# Altium footprint library WR-PHD_Socket Header.PcbLib: 279 footprints (part 15 of 18)
Each footprint in its own frame and in the unit in brackets; x right, y up, seen from the top. Pads: shape width x height; smd on the part's side, far side on the other; paste and mask are expansions set on the pad; w line width, h text height; cw(c..) or ccw(c..) is an arc to the next point about the centre after c.
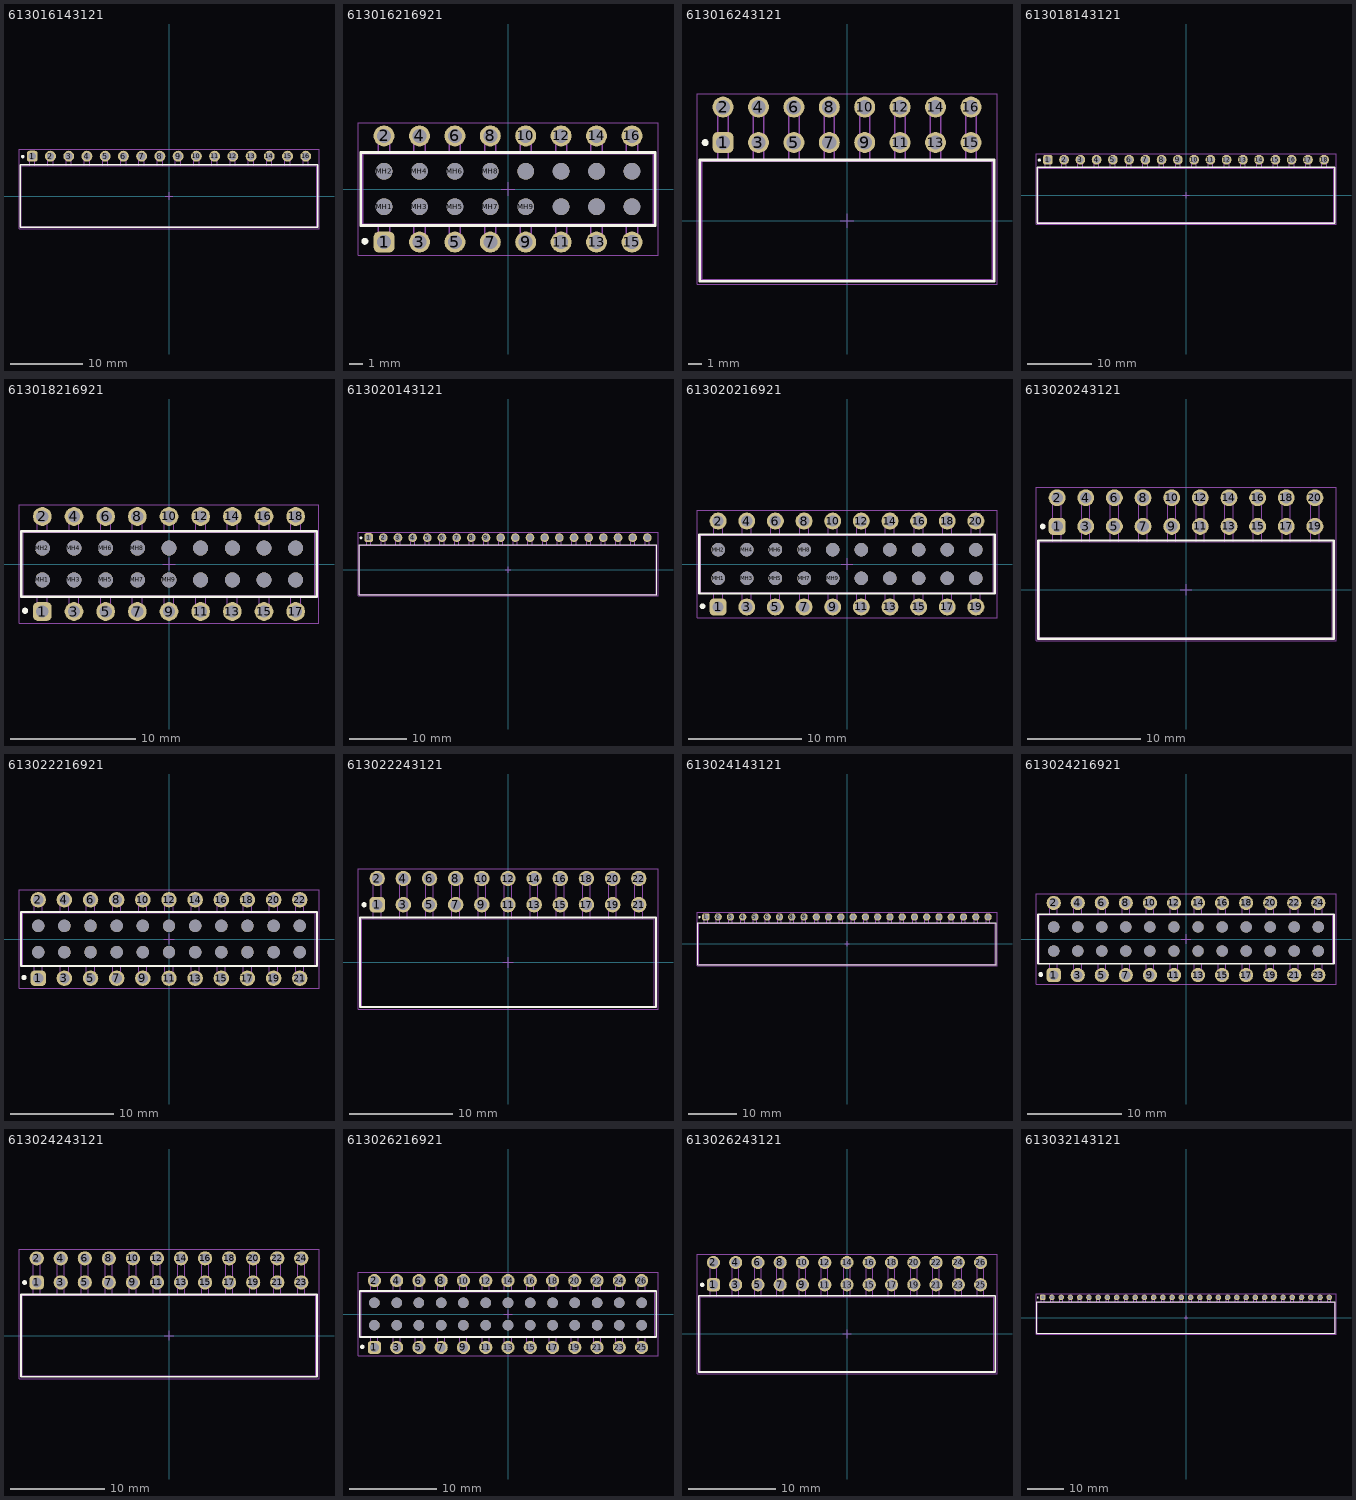
[diagram p14: the footprints below, top view; thin cyan lines are the x and y axes]

## 613016143121 [mm] "Socket Header, Pitch 2.54 mm, THT, Angled, single row, 16p"
height 2.5
pads (16):
  rrect50% 1.52x1.52 hole 1.02: 1(-19.05,5.55)
  round 1.52 hole 1.02: 2(-16.51,5.55) 3(-13.97,5.55) 4(-11.43,5.55) 5(-8.89,5.55) 6(-6.35,5.55) 7(-3.81,5.55) 8(-1.27,5.55) 9(1.27,5.55) 10(3.81,5.55) 11(6.35,5.55) 12(8.89,5.55) 13(11.43,5.55) 14(13.97,5.55) 15(16.51,5.55) 16(19.05,5.55)
Top Overlay:
  circle w0.25: c-20.38,5.5 r0.125
  lines w0.2: -20.695,-4.35 -20.695,4.35 20.695,4.35 20.695,-4.35 -20.695,-4.35
Top Designator:
  text ".Designator" at -7.498,-0.5 h1.5
Top Component Outline:
  lines w0.1: -19.42,4.25 -19.42,5.75 -18.68,5.75 -18.68,4.25 ; -16.88,4.25 -16.88,5.75 -16.14,5.75 -16.14,4.25 ; -14.34,4.25 -14.34,5.75 -13.6,5.75 -13.6,4.25 ; -11.8,4.25 -11.8,5.75 -11.06,5.75 -11.06,4.25 ; -9.26,4.25 -9.26,5.75 -8.52,5.75 -8.52,4.25 ; -6.72,4.25 -6.72,5.75 -5.98,5.75 -5.98,4.25 ; -4.18,4.25 -4.18,5.75 -3.44,5.75 -3.44,4.25 ; -1.64,4.25 -1.64,5.75 -0.9,5.75 -0.9,4.25 ; 0.9,4.25 0.9,5.75 1.64,5.75 1.64,4.25 ; 3.44,4.25 3.44,5.75 4.18,5.75 4.18,4.25 ; 5.98,4.25 5.98,5.75 6.72,5.75 6.72,4.25 ; 8.52,4.25 8.52,5.75 9.26,5.75 9.26,4.25 ; 11.06,4.25 11.06,5.75 11.8,5.75 11.8,4.25 ; 13.6,4.25 13.6,5.75 14.34,5.75 14.34,4.25 ; 16.14,4.25 16.14,5.75 16.88,5.75 16.88,4.25 ; 18.68,4.25 18.68,5.75 19.42,5.75 19.42,4.25 ; -20.57,-4.25 -20.57,4.25 20.57,4.25 20.57,-4.25 -20.57,-4.25
Top Courtyard:
  lines w0.05: -20.895,-4.55 20.895,-4.55 20.895,6.51 -20.895,6.51 -20.895,-4.55
Top Component Center:
  lines w0.05: -0.5,0 0.5,0 ; 0,-0.5 0,0.5
3D body "613016143121.stp": height 2.55, standoff -3.04, extent -20.57,-4.25 20.57,5.75

## 613016216921 [mm] "Socket Header, Pitch 2.54 mm, THT, Vertical, dual row, 16p"
height 5
pads (32):
  rrect50% 1.5x1.5 hole 1: 1(-8.89,-3.81)
  round 1.5 hole 1: 2(-8.89,3.81) 3(-6.35,-3.81) 4(-6.35,3.81) 5(-3.81,-3.81) 6(-3.81,3.81) 7(-1.27,-3.81) 8(-1.27,3.81) 9(1.27,-3.81) 10(1.27,3.81) 11(3.81,-3.81) 12(3.81,3.81) 13(6.35,-3.81) 14(6.35,3.81) 15(8.89,-3.81) 16(8.89,3.81)
  round 1.2 hole 1.2 unplated: MH1(-8.89,-1.27) MH2(-8.89,1.27) MH3(-6.35,-1.27) MH4(-6.35,1.27) MH5(-3.81,-1.27) MH6(-3.81,1.27) MH7(-1.27,-1.27) MH8(-1.27,1.27) MH9(1.27,-1.27) MH10(1.27,1.27) MH11(3.81,-1.27) MH12(3.81,1.27) MH13(6.35,-1.27) MH14(6.35,1.27) MH15(8.89,-1.27) MH16(8.89,1.27)
Top Overlay:
  circle w0.25: c-10.27,-3.75 r0.125
  lines w0.2: -10.56,-2.615 10.56,-2.615 10.56,2.615 -10.56,2.615 -10.56,-2.615
Top Designator:
  text ".Designator" at -7.498,-0.5 h1.5
Top Component Outline:
  lines w0.1: -9.29,-2.54 -9.29,-3.935 -8.49,-3.935 -8.49,-2.54 ; -9.29,2.54 -9.29,3.935 -8.49,3.935 -8.49,2.54 ; -6.75,-2.54 -6.75,-3.935 -5.95,-3.935 -5.95,-2.54 ; -6.75,2.54 -6.75,3.935 -5.95,3.935 -5.95,2.54 ; -4.21,-2.54 -4.21,-3.935 -3.41,-3.935 -3.41,-2.54 ; -4.21,2.54 -4.21,3.935 -3.41,3.935 -3.41,2.54 ; -1.67,-2.54 -1.67,-3.935 -0.87,-3.935 -0.87,-2.54 ; -1.67,2.54 -1.67,3.935 -0.87,3.935 -0.87,2.54 ; 0.87,-2.54 0.87,-3.935 1.67,-3.935 1.67,-2.54 ; 0.87,2.54 0.87,3.935 1.67,3.935 1.67,2.54 ; 3.41,-2.54 3.41,-3.935 4.21,-3.935 4.21,-2.54 ; 3.41,2.54 3.41,3.935 4.21,3.935 4.21,2.54 ; 5.95,-2.54 5.95,-3.935 6.75,-3.935 6.75,-2.54 ; 5.95,2.54 5.95,3.935 6.75,3.935 6.75,2.54 ; 8.49,-2.54 8.49,-3.935 9.29,-3.935 9.29,-2.54 ; 8.49,2.54 8.49,3.935 9.29,3.935 9.29,2.54 ; -10.41,-2.54 -10.41,2.54 10.41,2.54 10.41,-2.54 -10.41,-2.54
Top Courtyard:
  lines w0.05: -10.76,-4.76 10.76,-4.76 10.76,4.76 -10.76,4.76 -10.76,-4.76
Top Component Center:
  lines w0.05: -0.5,0 0.5,0 ; 0,-0.5 0,0.5
3D body "613016216921.stp": height 5.02, standoff -3.08, extent -10.41,-3.935 10.41,3.935

## 613016243121 [mm] "Socket Header, Pitch 2.54 mm, THT, Angled, dual row, 16p"
height 5.08
pads (16):
  rrect50% 1.5x1.5 hole 1.03: 1(-8.89,5.61)
  round 1.5 hole 1.03: 2(-8.89,8.15) 3(-6.35,5.61) 4(-6.35,8.15) 5(-3.81,5.61) 6(-3.81,8.15) 7(-1.27,5.61) 8(-1.27,8.15) 9(1.27,5.61) 10(1.27,8.15) 11(3.81,5.61) 12(3.81,8.15) 13(6.35,5.61) 14(6.35,8.15) 15(8.89,5.61) 16(8.89,8.15)
Top Overlay:
  circle w0.25: c-10.17,5.6 r0.125
  lines w0.2: -10.56,-4.35 10.56,-4.35 10.56,4.35 -10.56,4.35 -10.56,-4.35
Top Designator:
  text ".Designator" at -7.498,-0.5 h1.5
Top Component Outline:
  lines w0.1: -9.26,4.25 -9.26,8.35 -8.52,8.35 -8.52,4.25 ; -9.26,5.81 -8.52,5.81 ; -6.72,4.25 -6.72,8.35 -5.98,8.35 -5.98,4.25 ; -6.72,5.81 -5.98,5.81 ; -4.18,4.25 -4.18,8.35 -3.44,8.35 -3.44,4.25 ; -4.18,5.81 -3.44,5.81 ; -1.64,4.25 -1.64,8.35 -0.9,8.35 -0.9,4.25 ; -1.64,5.81 -0.9,5.81 ; 0.9,4.25 0.9,8.35 1.64,8.35 1.64,4.25 ; 0.9,5.81 1.64,5.81 ; 3.44,4.25 3.44,8.35 4.18,8.35 4.18,4.25 ; 3.44,5.81 4.18,5.81 ; 5.98,4.25 5.98,8.35 6.72,8.35 6.72,4.25 ; 5.98,5.81 6.72,5.81 ; 8.52,4.25 8.52,8.35 9.26,8.35 9.26,4.25 ; 8.52,5.81 9.26,5.81 ; -10.41,-4.25 -10.41,4.25 10.41,4.25 10.41,-4.25 -10.41,-4.25
Top Courtyard:
  lines w0.05: -10.76,-4.55 -10.76,9.1 10.76,9.1 10.76,-4.55 -10.76,-4.55
Top Component Center:
  lines w0.05: -0.5,0 0.5,0 ; 0,-0.5 0,0.5
3D body "613016243121.stp": height 5.05, standoff -3.25, extent -10.41,-4.25 10.41,8.35

## 613018143121 [mm] "Socket Header, Pitch 2.54 mm, THT, Angled, single row, 18p"
height 2.5
pads (18):
  rrect50% 1.52x1.52 hole 1.02: 1(-21.59,5.55)
  round 1.52 hole 1.02: 2(-19.05,5.55) 3(-16.51,5.55) 4(-13.97,5.55) 5(-11.43,5.55) 6(-8.89,5.55) 7(-6.35,5.55) 8(-3.81,5.55) 9(-1.27,5.55) 10(1.27,5.55) 11(3.81,5.55) 12(6.35,5.55) 13(8.89,5.55) 14(11.43,5.55) 15(13.97,5.55) 16(16.51,5.55) 17(19.05,5.55) 18(21.59,5.55)
Top Overlay:
  circle w0.25: c-22.92,5.5 r0.125
  lines w0.2: -23.235,-4.35 -23.235,4.35 23.235,4.35 23.235,-4.35 -23.235,-4.35
Top Designator:
  text ".Designator" at -7.498,-0.5 h1.5
Top Component Outline:
  lines w0.1: -21.96,4.25 -21.96,5.75 -21.22,5.75 -21.22,4.25 ; -19.42,4.25 -19.42,5.75 -18.68,5.75 -18.68,4.25 ; -16.88,4.25 -16.88,5.75 -16.14,5.75 -16.14,4.25 ; -14.34,4.25 -14.34,5.75 -13.6,5.75 -13.6,4.25 ; -11.8,4.25 -11.8,5.75 -11.06,5.75 -11.06,4.25 ; -9.26,4.25 -9.26,5.75 -8.52,5.75 -8.52,4.25 ; -6.72,4.25 -6.72,5.75 -5.98,5.75 -5.98,4.25 ; -4.18,4.25 -4.18,5.75 -3.44,5.75 -3.44,4.25 ; -1.64,4.25 -1.64,5.75 -0.9,5.75 -0.9,4.25 ; 0.9,4.25 0.9,5.75 1.64,5.75 1.64,4.25 ; 3.44,4.25 3.44,5.75 4.18,5.75 4.18,4.25 ; 5.98,4.25 5.98,5.75 6.72,5.75 6.72,4.25 ; 8.52,4.25 8.52,5.75 9.26,5.75 9.26,4.25 ; 11.06,4.25 11.06,5.75 11.8,5.75 11.8,4.25 ; 13.6,4.25 13.6,5.75 14.34,5.75 14.34,4.25 ; 16.14,4.25 16.14,5.75 16.88,5.75 16.88,4.25 ; 18.68,4.25 18.68,5.75 19.42,5.75 19.42,4.25 ; 21.22,4.25 21.22,5.75 21.96,5.75 21.96,4.25 ; -23.11,-4.25 23.11,-4.25 23.11,4.25 -23.11,4.25 -23.11,-4.25
Top Courtyard:
  lines w0.05: -23.435,-4.55 23.435,-4.55 23.435,6.51 -23.435,6.51 -23.435,-4.55
Top Component Center:
  lines w0.05: -0.5,0 0.5,0 ; 0,-0.5 0,0.5
3D body "613018143121.stp": height 2.55, standoff -3.04, extent -23.11,-4.25 23.11,5.75

## 613018216921 [mm] "Socket Header, Pitch 2.54 mm, THT, Vertical, dual row, 18p"
height 5
pads (36):
  rrect50% 1.5x1.5 hole 1: 1(-10.16,-3.81)
  round 1.5 hole 1: 2(-10.16,3.81) 3(-7.62,-3.81) 4(-7.62,3.81) 5(-5.08,-3.81) 6(-5.08,3.81) 7(-2.54,-3.81) 8(-2.54,3.81) 9(0,-3.81) 10(0,3.81) 11(2.54,-3.81) 12(2.54,3.81) 13(5.08,-3.81) 14(5.08,3.81) 15(7.62,-3.81) 16(7.62,3.81) 17(10.16,-3.81) 18(10.16,3.81)
  round 1.2 hole 1.2 unplated: MH1(-10.16,-1.27) MH2(-10.16,1.27) MH3(-7.62,-1.27) MH4(-7.62,1.27) MH5(-5.08,-1.27) MH6(-5.08,1.27) MH7(-2.54,-1.27) MH8(-2.54,1.27) MH9(0,-1.27) MH10(0,1.27) MH11(2.54,-1.27) MH12(2.54,1.27) MH13(5.08,-1.27) MH14(5.08,1.27) MH15(7.62,-1.27) MH16(7.62,1.27) MH17(10.16,-1.27) MH18(10.16,1.27)
Top Overlay:
  circle w0.25: c-11.54,-3.75 r0.125
  lines w0.2: -11.83,-2.615 -11.83,2.615 11.83,2.615 11.83,-2.615 -11.83,-2.615
Top Designator:
  text ".Designator" at -7.498,-0.5 h1.5
Top Component Outline:
  lines w0.1: -10.56,-2.54 -10.56,-3.935 -9.76,-3.935 -9.76,-2.54 ; -10.56,2.54 -10.56,3.935 -9.76,3.935 -9.76,2.54 ; -8.02,-2.54 -8.02,-3.935 -7.22,-3.935 -7.22,-2.54 ; -8.02,2.54 -8.02,3.935 -7.22,3.935 -7.22,2.54 ; -5.48,-2.54 -5.48,-3.935 -4.68,-3.935 -4.68,-2.54 ; -5.48,2.54 -5.48,3.935 -4.68,3.935 -4.68,2.54 ; -2.94,-2.54 -2.94,-3.935 -2.14,-3.935 -2.14,-2.54 ; -2.94,2.54 -2.94,3.935 -2.14,3.935 -2.14,2.54 ; -0.4,-2.54 -0.4,-3.935 0.4,-3.935 0.4,-2.54 ; -0.4,2.54 -0.4,3.935 0.4,3.935 0.4,2.54 ; 2.14,-2.54 2.14,-3.935 2.94,-3.935 2.94,-2.54 ; 2.14,2.54 2.14,3.935 2.94,3.935 2.94,2.54 ; 4.68,-2.54 4.68,-3.935 5.48,-3.935 5.48,-2.54 ; 4.68,2.54 4.68,3.935 5.48,3.935 5.48,2.54 ; 7.22,-2.54 7.22,-3.935 8.02,-3.935 8.02,-2.54 ; 7.22,2.54 7.22,3.935 8.02,3.935 8.02,2.54 ; 9.76,-2.54 9.76,-3.935 10.56,-3.935 10.56,-2.54 ; 9.76,2.54 9.76,3.935 10.56,3.935 10.56,2.54 ; -11.68,-2.54 -11.68,2.54 11.68,2.54 11.68,-2.54 -11.68,-2.54
Top Courtyard:
  lines w0.05: -12.03,-4.76 -12.03,4.76 12.03,4.76 12.03,-4.76 -12.03,-4.76
Top Component Center:
  lines w0.05: -0.5,0 0.5,0 ; 0,-0.5 0,0.5
3D body "613018216921.stp": height 5.02, standoff -3.08, extent -11.68,-3.935 11.68,3.935

## 613020143121 [mm] "Socket Header, Pitch 2.54 mm, THT, Angled, single row, 20p"
height 2.5
pads (20):
  rrect50% 1.52x1.52 hole 1.02: 1(-24.13,5.55)
  round 1.52 hole 1.02: 2(-21.59,5.55) 3(-19.05,5.55) 4(-16.51,5.55) 5(-13.97,5.55) 6(-11.43,5.55) 7(-8.89,5.55) 8(-6.35,5.55) 9(-3.81,5.55) 10(-1.27,5.55) 11(1.27,5.55) 12(3.81,5.55) 13(6.35,5.55) 14(8.89,5.55) 15(11.43,5.55) 16(13.97,5.55) 17(16.51,5.55) 18(19.05,5.55) 19(21.59,5.55) 20(24.13,5.55)
Top Overlay:
  circle w0.25: c-25.46,5.5 r0.125
  lines w0.2: -25.775,-4.35 25.775,-4.35 25.775,4.35 -25.775,4.35 -25.775,-4.35
Top Designator:
  text ".Designator" at -7.498,-0.5 h1.5
Top Component Outline:
  lines w0.1: -24.5,4.25 -24.5,5.75 -23.76,5.75 -23.76,4.25 ; -21.96,4.25 -21.96,5.75 -21.22,5.75 -21.22,4.25 ; -19.42,4.25 -19.42,5.75 -18.68,5.75 -18.68,4.25 ; -16.88,4.25 -16.88,5.75 -16.14,5.75 -16.14,4.25 ; -14.34,4.25 -14.34,5.75 -13.6,5.75 -13.6,4.25 ; -11.8,4.25 -11.8,5.75 -11.06,5.75 -11.06,4.25 ; -9.26,4.25 -9.26,5.75 -8.52,5.75 -8.52,4.25 ; -6.72,4.25 -6.72,5.75 -5.98,5.75 -5.98,4.25 ; -4.18,4.25 -4.18,5.75 -3.44,5.75 -3.44,4.25 ; -1.64,4.25 -1.64,5.75 -0.9,5.75 -0.9,4.25 ; 0.9,4.25 0.9,5.75 1.64,5.75 1.64,4.25 ; 3.44,4.25 3.44,5.75 4.18,5.75 4.18,4.25 ; 5.98,4.25 5.98,5.75 6.72,5.75 6.72,4.25 ; 8.52,4.25 8.52,5.75 9.26,5.75 9.26,4.25 ; 11.06,4.25 11.06,5.75 11.8,5.75 11.8,4.25 ; 13.6,4.25 13.6,5.75 14.34,5.75 14.34,4.25 ; 16.14,4.25 16.14,5.75 16.88,5.75 16.88,4.25 ; 18.68,4.25 18.68,5.75 19.42,5.75 19.42,4.25 ; 21.22,4.25 21.22,5.75 21.96,5.75 21.96,4.25 ; 23.76,4.25 23.76,5.75 24.5,5.75 24.5,4.25 ; -25.65,-4.25 -25.65,4.25 25.65,4.25 25.65,-4.25 -25.65,-4.25
Top Courtyard:
  lines w0.05: -25.975,-4.55 -25.975,6.51 25.975,6.51 25.975,-4.55 -25.975,-4.55
Top Component Center:
  lines w0.05: -0.5,0 0.5,0 ; 0,-0.5 0,0.5
3D body "613020143121.stp": height 2.55, standoff -3.04, extent -25.65,-4.25 25.65,5.75

## 613020216921 [mm] "Socket Header, Pitch 2.54 mm, THT, Vertical, dual row, 20p"
height 5
pads (40):
  rrect50% 1.5x1.5 hole 1: 1(-11.43,-3.81)
  round 1.5 hole 1: 2(-11.43,3.81) 3(-8.89,-3.81) 4(-8.89,3.81) 5(-6.35,-3.81) 6(-6.35,3.81) 7(-3.81,-3.81) 8(-3.81,3.81) 9(-1.27,-3.81) 10(-1.27,3.81) 11(1.27,-3.81) 12(1.27,3.81) 13(3.81,-3.81) 14(3.81,3.81) 15(6.35,-3.81) 16(6.35,3.81) 17(8.89,-3.81) 18(8.89,3.81) 19(11.43,-3.81) 20(11.43,3.81)
  round 1.2 hole 1.2 unplated: MH1(-11.43,-1.27) MH2(-11.43,1.27) MH3(-8.89,-1.27) MH4(-8.89,1.27) MH5(-6.35,-1.27) MH6(-6.35,1.27) MH7(-3.81,-1.27) MH8(-3.81,1.27) MH9(-1.27,-1.27) MH10(-1.27,1.27) MH11(1.27,-1.27) MH12(1.27,1.27) MH13(3.81,-1.27) MH14(3.81,1.27) MH15(6.35,-1.27) MH16(6.35,1.27) MH17(8.89,-1.27) MH18(8.89,1.27) MH19(11.43,-1.27) MH20(11.43,1.27)
Top Overlay:
  circle w0.25: c-12.81,-3.75 r0.125
  lines w0.2: -13.1,-2.615 -13.1,2.615 13.1,2.615 13.1,-2.615 -13.1,-2.615
Top Designator:
  text ".Designator" at -7.498,-0.5 h1.5
Top Component Outline:
  lines w0.1: -11.83,-2.54 -11.83,-3.935 -11.03,-3.935 -11.03,-2.54 ; -11.83,2.54 -11.83,3.935 -11.03,3.935 -11.03,2.54 ; -9.29,-2.54 -9.29,-3.935 -8.49,-3.935 -8.49,-2.54 ; -9.29,2.54 -9.29,3.935 -8.49,3.935 -8.49,2.54 ; -6.75,-2.54 -6.75,-3.935 -5.95,-3.935 -5.95,-2.54 ; -6.75,2.54 -6.75,3.935 -5.95,3.935 -5.95,2.54 ; -4.21,-2.54 -4.21,-3.935 -3.41,-3.935 -3.41,-2.54 ; -4.21,2.54 -4.21,3.935 -3.41,3.935 -3.41,2.54 ; -1.67,-2.54 -1.67,-3.935 -0.87,-3.935 -0.87,-2.54 ; -1.67,2.54 -1.67,3.935 -0.87,3.935 -0.87,2.54 ; 0.87,-2.54 0.87,-3.935 1.67,-3.935 1.67,-2.54 ; 0.87,2.54 0.87,3.935 1.67,3.935 1.67,2.54 ; 3.41,-2.54 3.41,-3.935 4.21,-3.935 4.21,-2.54 ; 3.41,2.54 3.41,3.935 4.21,3.935 4.21,2.54 ; 5.95,-2.54 5.95,-3.935 6.75,-3.935 6.75,-2.54 ; 5.95,2.54 5.95,3.935 6.75,3.935 6.75,2.54 ; 8.49,-2.54 8.49,-3.935 9.29,-3.935 9.29,-2.54 ; 8.49,2.54 8.49,3.935 9.29,3.935 9.29,2.54 ; 11.03,-2.54 11.03,-3.935 11.83,-3.935 11.83,-2.54 ; 11.03,2.54 11.03,3.935 11.83,3.935 11.83,2.54 ; -12.95,-2.54 12.95,-2.54 12.95,2.54 -12.95,2.54 -12.95,-2.54
Top Courtyard:
  lines w0.05: -13.3,-4.76 -13.3,4.76 13.3,4.76 13.3,-4.76 -13.3,-4.76
Top Component Center:
  lines w0.05: -0.5,0 0.5,0 ; 0,-0.5 0,0.5
3D body "613020216921.stp": height 5.02, standoff -3.08, extent -12.95,-3.935 12.95,3.935

## 613020243121 [mm] "Socket Header, Pitch 2.54 mm, THT, Angled, dual row, 20p"
height 5.08
pads (20):
  rrect50% 1.5x1.5 hole 1.03: 1(-11.43,5.61)
  round 1.5 hole 1.03: 2(-11.43,8.15) 3(-8.89,5.61) 4(-8.89,8.15) 5(-6.35,5.61) 6(-6.35,8.15) 7(-3.81,5.61) 8(-3.81,8.15) 9(-1.27,5.61) 10(-1.27,8.15) 11(1.27,5.61) 12(1.27,8.15) 13(3.81,5.61) 14(3.81,8.15) 15(6.35,5.61) 16(6.35,8.15) 17(8.89,5.61) 18(8.89,8.15) 19(11.43,5.61) 20(11.43,8.15)
Top Overlay:
  circle w0.25: c-12.71,5.6 r0.125
  lines w0.2: -13.1,-4.35 -13.1,4.35 13.1,4.35 13.1,-4.35 -13.1,-4.35
Top Designator:
  text ".Designator" at -7.498,-0.5 h1.5
Top Component Outline:
  lines w0.1: -11.8,4.25 -11.8,8.35 -11.06,8.35 -11.06,4.25 ; -11.8,5.81 -11.06,5.81 ; -9.26,4.25 -9.26,8.35 -8.52,8.35 -8.52,4.25 ; -9.26,5.81 -8.52,5.81 ; -6.72,4.25 -6.72,8.35 -5.98,8.35 -5.98,4.25 ; -6.72,5.81 -5.98,5.81 ; -4.18,4.25 -4.18,8.35 -3.44,8.35 -3.44,4.25 ; -4.18,5.81 -3.44,5.81 ; -1.64,4.25 -1.64,8.35 -0.9,8.35 -0.9,4.25 ; -1.64,5.81 -0.9,5.81 ; 0.9,4.25 0.9,8.35 1.64,8.35 1.64,4.25 ; 0.9,5.81 1.64,5.81 ; 3.44,4.25 3.44,8.35 4.18,8.35 4.18,4.25 ; 3.44,5.81 4.18,5.81 ; 5.98,4.25 5.98,8.35 6.72,8.35 6.72,4.25 ; 5.98,5.81 6.72,5.81 ; 8.52,4.25 8.52,8.35 9.26,8.35 9.26,4.25 ; 8.52,5.81 9.26,5.81 ; 11.06,4.25 11.06,8.35 11.8,8.35 11.8,4.25 ; 11.06,5.81 11.8,5.81 ; -12.95,-4.25 -12.95,4.25 12.95,4.25 12.95,-4.25 -12.95,-4.25
Top Courtyard:
  lines w0.05: -13.3,-4.55 13.3,-4.55 13.3,9.1 -13.3,9.1 -13.3,-4.55
Top Component Center:
  lines w0.05: -0.5,0 0.5,0 ; 0,-0.5 0,0.5
3D body "613020243121.stp": height 5.05, standoff -3.25, extent -12.95,-4.25 12.95,8.35

## 613022216921 [mm] "Socket Header, Pitch 2.54 mm, THT, Vertical, dual row, 22p"
height 5
pads (44):
  rrect50% 1.5x1.5 hole 1: 1(-12.7,-3.81)
  round 1.5 hole 1: 2(-12.7,3.81) 3(-10.16,-3.81) 4(-10.16,3.81) 5(-7.62,-3.81) 6(-7.62,3.81) 7(-5.08,-3.81) 8(-5.08,3.81) 9(-2.54,-3.81) 10(-2.54,3.81) 11(0,-3.81) 12(0,3.81) 13(2.54,-3.81) 14(2.54,3.81) 15(5.08,-3.81) 16(5.08,3.81) 17(7.62,-3.81) 18(7.62,3.81) 19(10.16,-3.81) 20(10.16,3.81) 21(12.7,-3.81) 22(12.7,3.81)
  round 1.2 hole 1.2 unplated: MH1(-12.7,-1.27) MH2(-12.7,1.27) MH3(-10.16,-1.27) MH4(-10.16,1.27) MH5(-7.62,-1.27) MH6(-7.62,1.27) MH7(-5.08,-1.27) MH8(-5.08,1.27) MH9(-2.54,-1.27) MH10(-2.54,1.27) MH11(0,-1.27) MH12(0,1.27) MH13(2.54,-1.27) MH14(2.54,1.27) MH15(5.08,-1.27) MH16(5.08,1.27) MH17(7.62,-1.27) MH18(7.62,1.27) MH19(10.16,-1.27) MH20(10.16,1.27) MH21(12.7,-1.27) MH22(12.7,1.27)
Top Overlay:
  circle w0.25: c-14.08,-3.75 r0.125
  lines w0.2: -14.37,-2.615 14.37,-2.615 14.37,2.615 -14.37,2.615 -14.37,-2.615
Top Designator:
  text ".Designator" at -7.498,-0.5 h1.5
Top Component Outline:
  lines w0.1: -13.1,-2.54 -13.1,-3.935 -12.3,-3.935 -12.3,-2.54 ; -13.1,2.54 -13.1,3.935 -12.3,3.935 -12.3,2.54 ; -10.56,-2.54 -10.56,-3.935 -9.76,-3.935 -9.76,-2.54 ; -10.56,2.54 -10.56,3.935 -9.76,3.935 -9.76,2.54 ; -8.02,-2.54 -8.02,-3.935 -7.22,-3.935 -7.22,-2.54 ; -8.02,2.54 -8.02,3.935 -7.22,3.935 -7.22,2.54 ; -5.48,-2.54 -5.48,-3.935 -4.68,-3.935 -4.68,-2.54 ; -5.48,2.54 -5.48,3.935 -4.68,3.935 -4.68,2.54 ; -2.94,-2.54 -2.94,-3.935 -2.14,-3.935 -2.14,-2.54 ; -2.94,2.54 -2.94,3.935 -2.14,3.935 -2.14,2.54 ; -0.4,-2.54 -0.4,-3.935 0.4,-3.935 0.4,-2.54 ; -0.4,2.54 -0.4,3.935 0.4,3.935 0.4,2.54 ; 2.14,-2.54 2.14,-3.935 2.94,-3.935 2.94,-2.54 ; 2.14,2.54 2.14,3.935 2.94,3.935 2.94,2.54 ; 4.68,-2.54 4.68,-3.935 5.48,-3.935 5.48,-2.54 ; 4.68,2.54 4.68,3.935 5.48,3.935 5.48,2.54 ; 7.22,-2.54 7.22,-3.935 8.02,-3.935 8.02,-2.54 ; 7.22,2.54 7.22,3.935 8.02,3.935 8.02,2.54 ; 9.76,-2.54 9.76,-3.935 10.56,-3.935 10.56,-2.54 ; 9.76,2.54 9.76,3.935 10.56,3.935 10.56,2.54 ; 12.3,-2.54 12.3,-3.935 13.1,-3.935 13.1,-2.54 ; 12.3,2.54 12.3,3.935 13.1,3.935 13.1,2.54 ; -14.22,-2.54 14.22,-2.54 14.22,2.54 -14.22,2.54 -14.22,-2.54
Top Courtyard:
  lines w0.05: -14.57,-4.76 14.57,-4.76 14.57,4.76 -14.57,4.76 -14.57,-4.76
Top Component Center:
  lines w0.05: -0.5,0 0.5,0 ; 0,-0.5 0,0.5
3D body "613022216921.stp": height 5.02, standoff -3.08, extent -14.22,-3.935 14.22,3.935

## 613022243121 [mm] "Socket Header, Pitch 2.54 mm, THT, Angled, dual row, 22p"
height 5.08
pads (22):
  rrect50% 1.5x1.5 hole 1.03: 1(-12.7,5.61)
  round 1.5 hole 1.03: 2(-12.7,8.15) 3(-10.16,5.61) 4(-10.16,8.15) 5(-7.62,5.61) 6(-7.62,8.15) 7(-5.08,5.61) 8(-5.08,8.15) 9(-2.54,5.61) 10(-2.54,8.15) 11(0,5.61) 12(0,8.15) 13(2.54,5.61) 14(2.54,8.15) 15(5.08,5.61) 16(5.08,8.15) 17(7.62,5.61) 18(7.62,8.15) 19(10.16,5.61) 20(10.16,8.15) 21(12.7,5.61) 22(12.7,8.15)
Top Overlay:
  circle w0.25: c-13.98,5.6 r0.125
  lines w0.2: -14.37,-4.35 -14.37,4.35 14.37,4.35 14.37,-4.35 -14.37,-4.35
Top Designator:
  text ".Designator" at -7.498,-0.5 h1.5
Top Component Outline:
  lines w0.1: -13.07,4.25 -13.07,8.35 -12.33,8.35 -12.33,4.25 ; -13.07,5.81 -12.33,5.81 ; -10.53,4.25 -10.53,8.35 -9.79,8.35 -9.79,4.25 ; -10.53,5.81 -9.79,5.81 ; -7.99,4.25 -7.99,8.35 -7.25,8.35 -7.25,4.25 ; -7.99,5.81 -7.25,5.81 ; -5.45,4.25 -5.45,8.35 -4.71,8.35 -4.71,4.25 ; -5.45,5.81 -4.71,5.81 ; -2.91,4.25 -2.91,8.35 -2.17,8.35 -2.17,4.25 ; -2.91,5.81 -2.17,5.81 ; -0.37,4.25 -0.37,8.35 0.37,8.35 0.37,4.25 ; -0.37,5.81 0.37,5.81 ; 2.17,4.25 2.17,8.35 2.91,8.35 2.91,4.25 ; 2.17,5.81 2.91,5.81 ; 4.71,4.25 4.71,8.35 5.45,8.35 5.45,4.25 ; 4.71,5.81 5.45,5.81 ; 7.25,4.25 7.25,8.35 7.99,8.35 7.99,4.25 ; 7.25,5.81 7.99,5.81 ; 9.79,4.25 9.79,8.35 10.53,8.35 10.53,4.25 ; 9.79,5.81 10.53,5.81 ; 12.33,4.25 12.33,8.35 13.07,8.35 13.07,4.25 ; 12.33,5.81 13.07,5.81 ; -14.22,-4.25 -14.22,4.25 14.22,4.25 14.22,-4.25 -14.22,-4.25
Top Courtyard:
  lines w0.05: -14.57,-4.55 14.57,-4.55 14.57,9.1 -14.57,9.1 -14.57,-4.55
Top Component Center:
  lines w0.05: -0.5,0 0.5,0 ; 0,-0.5 0,0.5
3D body "613022243121.stp": height 5.05, standoff -3.25, extent -14.22,-4.25 14.22,8.35

## 613024143121 [mm] "Socket Header, Pitch 2.54 mm, THT, Angled, single row, 24p"
height 2.5
pads (24):
  rrect50% 1.52x1.52 hole 1.02: 1(-29.21,5.55)
  round 1.52 hole 1.02: 2(-26.67,5.55) 3(-24.13,5.55) 4(-21.59,5.55) 5(-19.05,5.55) 6(-16.51,5.55) 7(-13.97,5.55) 8(-11.43,5.55) 9(-8.89,5.55) 10(-6.35,5.55) 11(-3.81,5.55) 12(-1.27,5.55) 13(1.27,5.55) 14(3.81,5.55) 15(6.35,5.55) 16(8.89,5.55) 17(11.43,5.55) 18(13.97,5.55) 19(16.51,5.55) 20(19.05,5.55) 21(21.59,5.55) 22(24.13,5.55) 23(26.67,5.55) 24(29.21,5.55)
Top Overlay:
  circle w0.25: c-30.54,5.5 r0.125
  lines w0.2: -30.855,-4.35 -30.855,4.35 30.855,4.35 30.855,-4.35 -30.855,-4.35
Top Designator:
  text ".Designator" at -7.498,-0.5 h1.5
Top Component Outline:
  lines w0.1: -29.58,4.25 -29.58,5.75 -28.84,5.75 -28.84,4.25 ; -27.04,4.25 -27.04,5.75 -26.3,5.75 -26.3,4.25 ; -24.5,4.25 -24.5,5.75 -23.76,5.75 -23.76,4.25 ; -21.96,4.25 -21.96,5.75 -21.22,5.75 -21.22,4.25 ; -19.42,4.25 -19.42,5.75 -18.68,5.75 -18.68,4.25 ; -16.88,4.25 -16.88,5.75 -16.14,5.75 -16.14,4.25 ; -14.34,4.25 -14.34,5.75 -13.6,5.75 -13.6,4.25 ; -11.8,4.25 -11.8,5.75 -11.06,5.75 -11.06,4.25 ; -9.26,4.25 -9.26,5.75 -8.52,5.75 -8.52,4.25 ; -6.72,4.25 -6.72,5.75 -5.98,5.75 -5.98,4.25 ; -4.18,4.25 -4.18,5.75 -3.44,5.75 -3.44,4.25 ; -1.64,4.25 -1.64,5.75 -0.9,5.75 -0.9,4.25 ; 0.9,4.25 0.9,5.75 1.64,5.75 1.64,4.25 ; 3.44,4.25 3.44,5.75 4.18,5.75 4.18,4.25 ; 5.98,4.25 5.98,5.75 6.72,5.75 6.72,4.25 ; 8.52,4.25 8.52,5.75 9.26,5.75 9.26,4.25 ; 11.06,4.25 11.06,5.75 11.8,5.75 11.8,4.25 ; 13.6,4.25 13.6,5.75 14.34,5.75 14.34,4.25 ; 16.14,4.25 16.14,5.75 16.88,5.75 16.88,4.25 ; 18.68,4.25 18.68,5.75 19.42,5.75 19.42,4.25 ; 21.22,4.25 21.22,5.75 21.96,5.75 21.96,4.25 ; 23.76,4.25 23.76,5.75 24.5,5.75 24.5,4.25 ; 26.3,4.25 26.3,5.75 27.04,5.75 27.04,4.25 ; 28.84,4.25 28.84,5.75 29.58,5.75 29.58,4.25 ; -30.73,-4.25 30.73,-4.25 30.73,4.25 -30.73,4.25 -30.73,-4.25
Top Courtyard:
  lines w0.05: -31.055,-4.55 31.055,-4.55 31.055,6.51 -31.055,6.51 -31.055,-4.55
Top Component Center:
  lines w0.05: -0.5,0 0.5,0 ; 0,-0.5 0,0.5
3D body "613024143121.stp": height 2.55, standoff -3.04, extent -30.73,-4.25 30.73,5.75

## 613024216921 [mm] "Socket Header, Pitch 2.54 mm, THT, Vertical, dual row, 24p"
height 5
pads (48):
  rrect50% 1.5x1.5 hole 1: 1(-13.97,-3.81)
  round 1.5 hole 1: 2(-13.97,3.81) 3(-11.43,-3.81) 4(-11.43,3.81) 5(-8.89,-3.81) 6(-8.89,3.81) 7(-6.35,-3.81) 8(-6.35,3.81) 9(-3.81,-3.81) 10(-3.81,3.81) 11(-1.27,-3.81) 12(-1.27,3.81) 13(1.27,-3.81) 14(1.27,3.81) 15(3.81,-3.81) 16(3.81,3.81) 17(6.35,-3.81) 18(6.35,3.81) 19(8.89,-3.81) 20(8.89,3.81) 21(11.43,-3.81) 22(11.43,3.81) 23(13.97,-3.81) 24(13.97,3.81)
  round 1.2 hole 1.2 unplated: MH1(-13.97,-1.27) MH2(-13.97,1.27) MH3(-11.43,-1.27) MH4(-11.43,1.27) MH5(-8.89,-1.27) MH6(-8.89,1.27) MH7(-6.35,-1.27) MH8(-6.35,1.27) MH9(-3.81,-1.27) MH10(-3.81,1.27) MH11(-1.27,-1.27) MH12(-1.27,1.27) MH13(1.27,-1.27) MH14(1.27,1.27) MH15(3.81,-1.27) MH16(3.81,1.27) MH17(6.35,-1.27) MH18(6.35,1.27) MH19(8.89,-1.27) MH20(8.89,1.27) MH21(11.43,-1.27) MH22(11.43,1.27) MH23(13.97,-1.27) MH24(13.97,1.27)
Top Overlay:
  circle w0.25: c-15.35,-3.75 r0.125
  lines w0.2: -15.64,-2.615 15.64,-2.615 15.64,2.615 -15.64,2.615 -15.64,-2.615
Top Designator:
  text ".Designator" at -7.498,-0.5 h1.5
Top Component Outline:
  lines w0.1: -14.37,-2.54 -14.37,-3.935 -13.57,-3.935 -13.57,-2.54 ; -14.37,2.54 -14.37,3.935 -13.57,3.935 -13.57,2.54 ; -11.83,-2.54 -11.83,-3.935 -11.03,-3.935 -11.03,-2.54 ; -11.83,2.54 -11.83,3.935 -11.03,3.935 -11.03,2.54 ; -9.29,-2.54 -9.29,-3.935 -8.49,-3.935 -8.49,-2.54 ; -9.29,2.54 -9.29,3.935 -8.49,3.935 -8.49,2.54 ; -6.75,-2.54 -6.75,-3.935 -5.95,-3.935 -5.95,-2.54 ; -6.75,2.54 -6.75,3.935 -5.95,3.935 -5.95,2.54 ; -4.21,-2.54 -4.21,-3.935 -3.41,-3.935 -3.41,-2.54 ; -4.21,2.54 -4.21,3.935 -3.41,3.935 -3.41,2.54 ; -1.67,-2.54 -1.67,-3.935 -0.87,-3.935 -0.87,-2.54 ; -1.67,2.54 -1.67,3.935 -0.87,3.935 -0.87,2.54 ; 0.87,-2.54 0.87,-3.935 1.67,-3.935 1.67,-2.54 ; 0.87,2.54 0.87,3.935 1.67,3.935 1.67,2.54 ; 3.41,-2.54 3.41,-3.935 4.21,-3.935 4.21,-2.54 ; 3.41,2.54 3.41,3.935 4.21,3.935 4.21,2.54 ; 5.95,-2.54 5.95,-3.935 6.75,-3.935 6.75,-2.54 ; 5.95,2.54 5.95,3.935 6.75,3.935 6.75,2.54 ; 8.49,-2.54 8.49,-3.935 9.29,-3.935 9.29,-2.54 ; 8.49,2.54 8.49,3.935 9.29,3.935 9.29,2.54 ; 11.03,-2.54 11.03,-3.935 11.83,-3.935 11.83,-2.54 ; 11.03,2.54 11.03,3.935 11.83,3.935 11.83,2.54 ; 13.57,-2.54 13.57,-3.935 14.37,-3.935 14.37,-2.54 ; 13.57,2.54 13.57,3.935 14.37,3.935 14.37,2.54 ; -15.49,-2.54 -15.49,2.54 15.49,2.54 15.49,-2.54 -15.49,-2.54
Top Courtyard:
  lines w0.05: -15.84,-4.76 15.84,-4.76 15.84,4.76 -15.84,4.76 -15.84,-4.76
Top Component Center:
  lines w0.05: -0.5,0 0.5,0 ; 0,-0.5 0,0.5
3D body "613024216921.stp": height 5.02, standoff -3.08, extent -15.49,-3.935 15.49,3.935

## 613024243121 [mm] "Socket Header, Pitch 2.54 mm, THT, Angled, dual row, 24p"
height 5.08
pads (24):
  rrect50% 1.5x1.5 hole 1.03: 1(-13.97,5.61)
  round 1.5 hole 1.03: 2(-13.97,8.15) 3(-11.43,5.61) 4(-11.43,8.15) 5(-8.89,5.61) 6(-8.89,8.15) 7(-6.35,5.61) 8(-6.35,8.15) 9(-3.81,5.61) 10(-3.81,8.15) 11(-1.27,5.61) 12(-1.27,8.15) 13(1.27,5.61) 14(1.27,8.15) 15(3.81,5.61) 16(3.81,8.15) 17(6.35,5.61) 18(6.35,8.15) 19(8.89,5.61) 20(8.89,8.15) 21(11.43,5.61) 22(11.43,8.15) 23(13.97,5.61) 24(13.97,8.15)
Top Overlay:
  circle w0.25: c-15.25,5.6 r0.125
  lines w0.2: -15.64,-4.35 15.64,-4.35 15.64,4.35 -15.64,4.35 -15.64,-4.35
Top Designator:
  text ".Designator" at -7.498,-0.5 h1.5
Top Component Outline:
  lines w0.1: -14.34,4.25 -14.34,8.35 -13.6,8.35 -13.6,4.25 ; -14.34,5.81 -13.6,5.81 ; -11.8,4.25 -11.8,8.35 -11.06,8.35 -11.06,4.25 ; -11.8,5.81 -11.06,5.81 ; -9.26,4.25 -9.26,8.35 -8.52,8.35 -8.52,4.25 ; -9.26,5.81 -8.52,5.81 ; -6.72,4.25 -6.72,8.35 -5.98,8.35 -5.98,4.25 ; -6.72,5.81 -5.98,5.81 ; -4.18,4.25 -4.18,8.35 -3.44,8.35 -3.44,4.25 ; -4.18,5.81 -3.44,5.81 ; -1.64,4.25 -1.64,8.35 -0.9,8.35 -0.9,4.25 ; -1.64,5.81 -0.9,5.81 ; 0.9,4.25 0.9,8.35 1.64,8.35 1.64,4.25 ; 0.9,5.81 1.64,5.81 ; 3.44,4.25 3.44,8.35 4.18,8.35 4.18,4.25 ; 3.44,5.81 4.18,5.81 ; 5.98,4.25 5.98,8.35 6.72,8.35 6.72,4.25 ; 5.98,5.81 6.72,5.81 ; 8.52,4.25 8.52,8.35 9.26,8.35 9.26,4.25 ; 8.52,5.81 9.26,5.81 ; 11.06,4.25 11.06,8.35 11.8,8.35 11.8,4.25 ; 11.06,5.81 11.8,5.81 ; 13.6,4.25 13.6,8.35 14.34,8.35 14.34,4.25 ; 13.6,5.81 14.34,5.81 ; -15.49,-4.25 15.49,-4.25 15.49,4.25 -15.49,4.25 -15.49,-4.25
Top Courtyard:
  lines w0.05: -15.84,-4.55 -15.84,9.1 15.84,9.1 15.84,-4.55 -15.84,-4.55
Top Component Center:
  lines w0.05: -0.5,0 0.5,0 ; 0,-0.5 0,0.5
3D body "613024243121.stp": height 5.05, standoff -3.25, extent -15.49,-4.25 15.49,8.35

## 613026216921 [mm] "Socket Header, Pitch 2.54 mm, THT, Vertical, dual row, 26p"
height 5
pads (52):
  rrect50% 1.5x1.5 hole 1: 1(-15.24,-3.81)
  round 1.5 hole 1: 2(-15.24,3.81) 3(-12.7,-3.81) 4(-12.7,3.81) 5(-10.16,-3.81) 6(-10.16,3.81) 7(-7.62,-3.81) 8(-7.62,3.81) 9(-5.08,-3.81) 10(-5.08,3.81) 11(-2.54,-3.81) 12(-2.54,3.81) 13(0,-3.81) 14(0,3.81) 15(2.54,-3.81) 16(2.54,3.81) 17(5.08,-3.81) 18(5.08,3.81) 19(7.62,-3.81) 20(7.62,3.81) 21(10.16,-3.81) 22(10.16,3.81) 23(12.7,-3.81) 24(12.7,3.81) 25(15.24,-3.81) 26(15.24,3.81)
  round 1.2 hole 1.2 unplated: MH1(-15.24,-1.27) MH2(-15.24,1.27) MH3(-12.7,-1.27) MH4(-12.7,1.27) MH5(-10.16,-1.27) MH6(-10.16,1.27) MH7(-7.62,-1.27) MH8(-7.62,1.27) MH9(-5.08,-1.27) MH10(-5.08,1.27) MH11(-2.54,-1.27) MH12(-2.54,1.27) MH13(0,-1.27) MH14(0,1.27) MH15(2.54,-1.27) MH16(2.54,1.27) MH17(5.08,-1.27) MH18(5.08,1.27) MH19(7.62,-1.27) MH20(7.62,1.27) MH21(10.16,-1.27) MH22(10.16,1.27) MH23(12.7,-1.27) MH24(12.7,1.27) MH25(15.24,-1.27) MH26(15.24,1.27)
Top Overlay:
  circle w0.25: c-16.62,-3.75 r0.125
  lines w0.2: -16.91,-2.615 -16.91,2.615 16.91,2.615 16.91,-2.615 -16.91,-2.615
Top Designator:
  text ".Designator" at -7.498,-0.5 h1.5
Top Component Outline:
  lines w0.1: -15.64,-2.54 -15.64,-3.935 -14.84,-3.935 -14.84,-2.54 ; -15.64,2.54 -15.64,3.935 -14.84,3.935 -14.84,2.54 ; -13.1,-2.54 -13.1,-3.935 -12.3,-3.935 -12.3,-2.54 ; -13.1,2.54 -13.1,3.935 -12.3,3.935 -12.3,2.54 ; -10.56,-2.54 -10.56,-3.935 -9.76,-3.935 -9.76,-2.54 ; -10.56,2.54 -10.56,3.935 -9.76,3.935 -9.76,2.54 ; -8.02,-2.54 -8.02,-3.935 -7.22,-3.935 -7.22,-2.54 ; -8.02,2.54 -8.02,3.935 -7.22,3.935 -7.22,2.54 ; -5.48,-2.54 -5.48,-3.935 -4.68,-3.935 -4.68,-2.54 ; -5.48,2.54 -5.48,3.935 -4.68,3.935 -4.68,2.54 ; -2.94,-2.54 -2.94,-3.935 -2.14,-3.935 -2.14,-2.54 ; -2.94,2.54 -2.94,3.935 -2.14,3.935 -2.14,2.54 ; -0.4,-2.54 -0.4,-3.935 0.4,-3.935 0.4,-2.54 ; -0.4,2.54 -0.4,3.935 0.4,3.935 0.4,2.54 ; 2.14,-2.54 2.14,-3.935 2.94,-3.935 2.94,-2.54 ; 2.14,2.54 2.14,3.935 2.94,3.935 2.94,2.54 ; 4.68,-2.54 4.68,-3.935 5.48,-3.935 5.48,-2.54 ; 4.68,2.54 4.68,3.935 5.48,3.935 5.48,2.54 ; 7.22,-2.54 7.22,-3.935 8.02,-3.935 8.02,-2.54 ; 7.22,2.54 7.22,3.935 8.02,3.935 8.02,2.54 ; 9.76,-2.54 9.76,-3.935 10.56,-3.935 10.56,-2.54 ; 9.76,2.54 9.76,3.935 10.56,3.935 10.56,2.54 ; 12.3,-2.54 12.3,-3.935 13.1,-3.935 13.1,-2.54 ; 12.3,2.54 12.3,3.935 13.1,3.935 13.1,2.54 ; 14.84,-2.54 14.84,-3.935 15.64,-3.935 15.64,-2.54 ; 14.84,2.54 14.84,3.935 15.64,3.935 15.64,2.54 ; -16.76,-2.54 -16.76,2.54 16.76,2.54 16.76,-2.54 -16.76,-2.54
Top Courtyard:
  lines w0.05: -17.11,-4.76 -17.11,4.76 17.11,4.76 17.11,-4.76 -17.11,-4.76
Top Component Center:
  lines w0.05: -0.5,0 0.5,0 ; 0,-0.5 0,0.5
3D body "613026216921.stp": height 5.02, standoff -3.08, extent -16.76,-3.935 16.76,3.935

## 613026243121 [mm] "Socket Header, Pitch 2.54 mm, THT, Angled, dual row, 26p"
height 5.08
pads (26):
  rrect50% 1.5x1.5 hole 1.03: 1(-15.24,5.61)
  round 1.5 hole 1.03: 2(-15.24,8.15) 3(-12.7,5.61) 4(-12.7,8.15) 5(-10.16,5.61) 6(-10.16,8.15) 7(-7.62,5.61) 8(-7.62,8.15) 9(-5.08,5.61) 10(-5.08,8.15) 11(-2.54,5.61) 12(-2.54,8.15) 13(0,5.61) 14(0,8.15) 15(2.54,5.61) 16(2.54,8.15) 17(5.08,5.61) 18(5.08,8.15) 19(7.62,5.61) 20(7.62,8.15) 21(10.16,5.61) 22(10.16,8.15) 23(12.7,5.61) 24(12.7,8.15) 25(15.24,5.61) 26(15.24,8.15)
Top Overlay:
  circle w0.25: c-16.52,5.6 r0.125
  lines w0.2: -16.91,-4.35 -16.91,4.35 16.91,4.35 16.91,-4.35 -16.91,-4.35
Top Designator:
  text ".Designator" at -7.498,-0.5 h1.5
Top Component Outline:
  lines w0.1: -15.61,4.25 -15.61,8.35 -14.87,8.35 -14.87,4.25 ; -15.61,5.81 -14.87,5.81 ; -13.07,4.25 -13.07,8.35 -12.33,8.35 -12.33,4.25 ; -13.07,5.81 -12.33,5.81 ; -10.53,4.25 -10.53,8.35 -9.79,8.35 -9.79,4.25 ; -10.53,5.81 -9.79,5.81 ; -7.99,4.25 -7.99,8.35 -7.25,8.35 -7.25,4.25 ; -7.99,5.81 -7.25,5.81 ; -5.45,4.25 -5.45,8.35 -4.71,8.35 -4.71,4.25 ; -5.45,5.81 -4.71,5.81 ; -2.91,4.25 -2.91,8.35 -2.17,8.35 -2.17,4.25 ; -2.91,5.81 -2.17,5.81 ; -0.37,4.25 -0.37,8.35 0.37,8.35 0.37,4.25 ; -0.37,5.81 0.37,5.81 ; 2.17,4.25 2.17,8.35 2.91,8.35 2.91,4.25 ; 2.17,5.81 2.91,5.81 ; 4.71,4.25 4.71,8.35 5.45,8.35 5.45,4.25 ; 4.71,5.81 5.45,5.81 ; 7.25,4.25 7.25,8.35 7.99,8.35 7.99,4.25 ; 7.25,5.81 7.99,5.81 ; 9.79,4.25 9.79,8.35 10.53,8.35 10.53,4.25 ; 9.79,5.81 10.53,5.81 ; 12.33,4.25 12.33,8.35 13.07,8.35 13.07,4.25 ; 12.33,5.81 13.07,5.81 ; 14.87,4.25 14.87,8.35 15.61,8.35 15.61,4.25 ; 14.87,5.81 15.61,5.81 ; -16.76,-4.25 16.76,-4.25 16.76,4.25 -16.76,4.25 -16.76,-4.25
Top Courtyard:
  lines w0.05: -17.11,-4.55 17.11,-4.55 17.11,9.1 -17.11,9.1 -17.11,-4.55
Top Component Center:
  lines w0.05: -0.5,0 0.5,0 ; 0,-0.5 0,0.5
3D body "613026243121.stp": height 5.05, standoff -3.25, extent -16.76,-4.25 16.76,8.35

## 613032143121 [mm] "Socket Header, Pitch 2.54 mm, THT, Angled, single row, 32p"
height 2.5
pads (32):
  rrect50% 1.52x1.52 hole 1.02: 1(-39.37,5.55)
  round 1.52 hole 1.02: 2(-36.83,5.55) 3(-34.29,5.55) 4(-31.75,5.55) 5(-29.21,5.55) 6(-26.67,5.55) 7(-24.13,5.55) 8(-21.59,5.55) 9(-19.05,5.55) 10(-16.51,5.55) 11(-13.97,5.55) 12(-11.43,5.55) 13(-8.89,5.55) 14(-6.35,5.55) 15(-3.81,5.55) 16(-1.27,5.55) 17(1.27,5.55) 18(3.81,5.55) 19(6.35,5.55) 20(8.89,5.55) 21(11.43,5.55) 22(13.97,5.55) 23(16.51,5.55) 24(19.05,5.55) 25(21.59,5.55) 26(24.13,5.55) 27(26.67,5.55) 28(29.21,5.55) 29(31.75,5.55) 30(34.29,5.55) 31(36.83,5.55) 32(39.37,5.55)
Top Overlay:
  circle w0.25: c-40.7,5.5 r0.125
  lines w0.2: -41.015,-4.35 41.015,-4.35 41.015,4.35 -41.015,4.35 -41.015,-4.35
Top Designator:
  text ".Designator" at -7.498,-0.5 h1.5
Top Component Outline:
  lines w0.1: -39.74,4.25 -39.74,5.75 -39,5.75 -39,4.25 ; -37.2,4.25 -37.2,5.75 -36.46,5.75 -36.46,4.25 ; -34.66,4.25 -34.66,5.75 -33.92,5.75 -33.92,4.25 ; -32.12,4.25 -32.12,5.75 -31.38,5.75 -31.38,4.25 ; -29.58,4.25 -29.58,5.75 -28.84,5.75 -28.84,4.25 ; -27.04,4.25 -27.04,5.75 -26.3,5.75 -26.3,4.25 ; -24.5,4.25 -24.5,5.75 -23.76,5.75 -23.76,4.25 ; -21.96,4.25 -21.96,5.75 -21.22,5.75 -21.22,4.25 ; -19.42,4.25 -19.42,5.75 -18.68,5.75 -18.68,4.25 ; -16.88,4.25 -16.88,5.75 -16.14,5.75 -16.14,4.25 ; -14.34,4.25 -14.34,5.75 -13.6,5.75 -13.6,4.25 ; -11.8,4.25 -11.8,5.75 -11.06,5.75 -11.06,4.25 ; -9.26,4.25 -9.26,5.75 -8.52,5.75 -8.52,4.25 ; -6.72,4.25 -6.72,5.75 -5.98,5.75 -5.98,4.25 ; -4.18,4.25 -4.18,5.75 -3.44,5.75 -3.44,4.25 ; -1.64,4.25 -1.64,5.75 -0.9,5.75 -0.9,4.25 ; 0.9,4.25 0.9,5.75 1.64,5.75 1.64,4.25 ; 3.44,4.25 3.44,5.75 4.18,5.75 4.18,4.25 ; 5.98,4.25 5.98,5.75 6.72,5.75 6.72,4.25 ; 8.52,4.25 8.52,5.75 9.26,5.75 9.26,4.25 ; 11.06,4.25 11.06,5.75 11.8,5.75 11.8,4.25 ; 13.6,4.25 13.6,5.75 14.34,5.75 14.34,4.25 ; 16.14,4.25 16.14,5.75 16.88,5.75 16.88,4.25 ; 18.68,4.25 18.68,5.75 19.42,5.75 19.42,4.25 ; 21.22,4.25 21.22,5.75 21.96,5.75 21.96,4.25 ; 23.76,4.25 23.76,5.75 24.5,5.75 24.5,4.25 ; 26.3,4.25 26.3,5.75 27.04,5.75 27.04,4.25 ; 28.84,4.25 28.84,5.75 29.58,5.75 29.58,4.25 ; 31.38,4.25 31.38,5.75 32.12,5.75 32.12,4.25 ; 33.92,4.25 33.92,5.75 34.66,5.75 34.66,4.25 ; 36.46,4.25 36.46,5.75 37.2,5.75 37.2,4.25 ; 39,4.25 39,5.75 39.74,5.75 39.74,4.25 ; -40.89,-4.25 40.89,-4.25 40.89,4.25 -40.89,4.25 -40.89,-4.25
Top Courtyard:
  lines w0.05: -41.215,-4.55 -41.215,6.51 41.215,6.51 41.215,-4.55 -41.215,-4.55
Top Component Center:
  lines w0.05: -0.5,0 0.5,0 ; 0,-0.5 0,0.5
3D body "613032143121.stp": height 2.55, standoff -3.04, extent -40.89,-4.25 40.89,5.75